# Altium footprint library PTUMotorDriver.PcbLib: 51 footprints (part 3 of 4)
Each footprint in its own frame and in the unit in brackets; x right, y up, seen from the top. Pads: shape width x height; smd on the part's side, far side on the other; paste and mask are expansions set on the pad; w line width, h text height; cw(c..) or ccw(c..) is an arc to the next point about the centre after c.
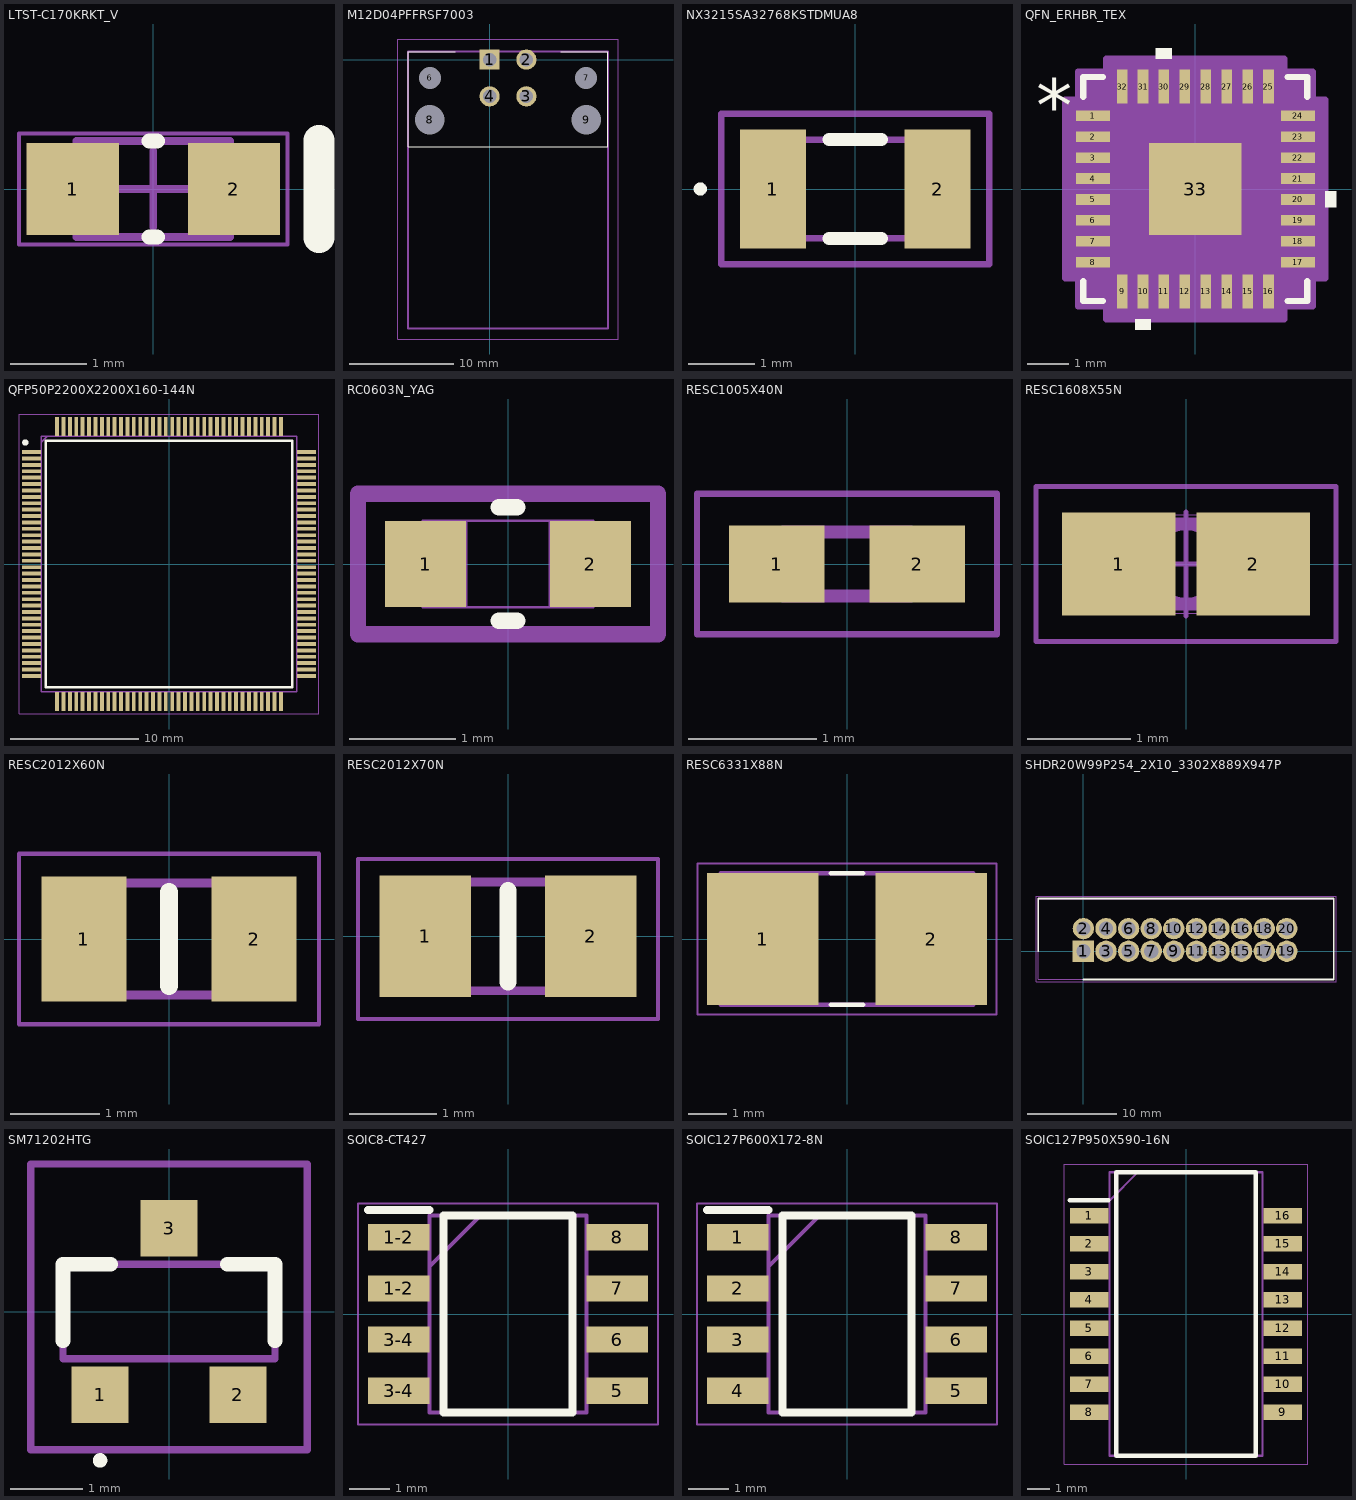
[diagram p2: the footprints below, top view; thin cyan lines are the x and y axes]

## LTST-C170KRKT_V [mm] "SMD, 2-Leads, Body 2x1.25mm"
height 1.2
pads (2):
  rect 1.2x1.2 smd: 1(-1.05,0) 2(1.05,0)
Top Overlay:
  lines w0.2: -0.051,-0.625 0.051,-0.625 ; -0.051,0.625 0.051,0.625
  lines w0.4: 2.159,-0.635 2.159,0.635
Top 3D Body:
  lines w0.1: -0.7,-0.625 -0.7,0.625 ; 0.7,-0.625 0.7,0.625 ; -1,-0.625 1,-0.625 1,0.625 -1,0.625 -1,-0.625
Top Courtyard:
  lines w0.05: -1.75,-0.725 -1.75,0.725 1.75,0.725 1.75,-0.725 -1.75,-0.725
  lines w0.1: -0.5,0 0.5,0 ; 0,-0.5 0,0.5
3D body: height 1.2, standoff 0.5, extent -0.7,-0.625 0.7,0.625
3D body: height 0.5, standoff 0, extent -1,-0.625 1,0.625

## M12D04PFFRSF7003 [mm]
pads (8):
  rect 1.95x1.95 hole 1.3: 1(0,0)
  round 1.95 hole 1.3: 2(3.536,0) 3(3.536,-3.536) 4(0,-3.536)
  round 1.05 hole 2.1 unplated: 6(-5.732,-1.768) 7(9.268,-1.768)
  round 1.425 hole 2.85 unplated: 8(-5.732,-5.768) 9(9.268,-5.768)
Top Overlay:
  lines w0.1: -3.312,0.772 -7.832,0.772 -7.832,-8.382 11.368,-8.382 11.368,0.772 6.848,0.772
Top 3D Body:
  lines w0.2: -7.832,-25.828 -7.832,0.772 11.368,0.772 11.368,-25.828 -7.832,-25.828
Top Courtyard:
  lines w0.1: -8.832,-26.828 -8.832,1.975 12.368,1.975 12.368,-26.828 -8.832,-26.828
3D body "M12D-04PFFR-SF7003.stp": height 15.88, standoff -3.32, extent -7.747,-25.201 11.432,1.579

## NX3215SA32768KSTDMUA8 [mm]
pads (2):
  rect 1x1.8 smd: 1(-1.25,0) 2(1.25,0)
Top Overlay:
  lines w0.1: -2.4,0 cw(c-2.35,0) -2.3,0 cw(c-2.35,0) -2.4,0
  lines w0.2: -0.4,-0.75 0.4,-0.75 ; -0.4,0.75 0.4,0.75
Top 3D Body:
  lines w0.1: -1.6,-0.75 -1.6,0.75 1.6,0.75 1.6,-0.75 -1.6,-0.75
Top Courtyard:
  lines w0.1: -2.032,-1.143 -2.032,1.143 2.032,1.143 2.032,-1.143 -2.032,-1.143
3D body "NX3215SA-32.768K-STD-MUA-8.stp": height 0.8, standoff 0, extent -1.6,-0.75 1.6,0.75

## QFN_ERHBR_TEX [mil]
pads (33):
  rect 32x10 smd paste+0 mask+0: 1(-96.5,68.92) 2(-96.5,49.23) 3(-96.5,29.54) 4(-96.5,9.85) 5(-96.5,-9.85) 6(-96.5,-29.54) 7(-96.5,-49.23) 8(-96.5,-68.92) 17(96.5,-68.92) 18(96.5,-49.23) 19(96.5,-29.54) 20(96.5,-9.85) 21(96.5,9.85) 22(96.5,29.54) 23(96.5,49.23) 24(96.5,68.92)
  rect 10x32 smd paste+0 mask+0: 9(-68.92,-96.5) 10(-49.23,-96.5) 11(-29.54,-96.5) 12(-9.85,-96.5) 13(9.85,-96.5) 14(29.54,-96.5) 15(49.23,-96.5) 16(68.92,-96.5) 25(68.92,96.5) 26(49.23,96.5) 27(29.54,96.5) 28(9.85,96.5) 29(-9.85,96.5) 30(-29.54,96.5) 31(-49.23,96.5) 32(-68.92,96.5)
  rect 87x87 smd paste+0 mask+0: 33(0,0)
Top Overlay:
  region: -41.73,-122.5 -56.73,-122.5 -56.73,-132.5 -41.73,-132.5
  region: 122.5,-2.35 132.5,-2.35 132.5,-17.34 122.5,-17.34
  region: -22.04,122.5 -37.03,122.5 -37.03,132.5 -22.04,132.5
  lines w6: -105.5,-87.02 -105.5,-105.5 -87.02,-105.5 ; -105.5,87.02 -105.5,105.5 -87.02,105.5 ; 87.02,-105.5 105.5,-105.5 105.5,-87.02 ; 87.02,105.5 105.5,105.5 105.5,87.02
  text "*" at -150,53.76 h50
Top 3D Body:
  lines w1: -100.5,50.5 -50.5,100.5 ; -100.5,-100.5 100.5,-100.5 100.5,100.5 -100.5,100.5 -100.5,-100.5 ; -100.5,-74.92 -100.5,-62.91 -100.5,-74.92 ; -100.5,-55.23 -100.5,-43.23 -100.5,-55.23 ; -100.5,-35.53 -100.5,-23.54 -100.5,-35.53 ; -100.5,-15.85 -100.5,-3.85 -100.5,-15.85 ; -100.5,3.85 -100.5,15.85 -100.5,3.85 ; -100.5,23.54 -100.5,35.53 -100.5,23.54 ; -100.5,43.23 -100.5,55.23 -100.5,43.23 ; -100.5,62.91 -100.5,74.92 -100.5,62.91 ; -74.92,-100.5 -62.91,-100.5 -74.92,-100.5 ; -74.92,100.5 -62.91,100.5 -74.92,100.5 ; -55.23,-100.5 -43.23,-100.5 -55.23,-100.5 ; -55.23,100.5 -43.23,100.5 -55.23,100.5 ; -35.53,-100.5 -23.54,-100.5 -35.53,-100.5 ; -35.53,100.5 -23.54,100.5 -35.53,100.5 ; -15.85,-100.5 -3.85,-100.5 -15.85,-100.5 ; -15.85,100.5 -3.85,100.5 -15.85,100.5 ; 3.85,-100.5 15.85,-100.5 3.85,-100.5 ; 3.85,100.5 15.85,100.5 3.85,100.5 ; 23.54,-100.5 35.53,-100.5 23.54,-100.5 ; 23.54,100.5 35.53,100.5 23.54,100.5 ; 43.23,-100.5 55.23,-100.5 43.23,-100.5 ; 43.23,100.5 55.23,100.5 43.23,100.5 ; 62.91,-100.5 74.92,-100.5 62.91,-100.5 ; 62.91,100.5 74.92,100.5 62.91,100.5 ; 100.5,-74.92 100.5,-62.91 100.5,-74.92 ; 100.5,-55.23 100.5,-43.23 100.5,-55.23 ; 100.5,-35.53 100.5,-23.54 100.5,-35.53 ; 100.5,-15.85 100.5,-3.85 100.5,-15.85 ; 100.5,3.85 100.5,15.85 100.5,3.85 ; 100.5,23.54 100.5,35.53 100.5,23.54 ; 100.5,43.23 100.5,55.23 100.5,43.23 ; 100.5,62.91 100.5,74.92 100.5,62.91
  text "*" at -93,53.76 h50
Top Courtyard:
  region: -83.92,-110.5 -110.5,-110.5 -110.5,-83.92 -122.5,-83.92 -122.5,83.92 -110.5,83.92 -110.5,110.5 -83.92,110.5 -83.92,122.5 83.92,122.5 83.92,110.5 110.5,110.5 110.5,83.92 122.5,83.92 122.5,-83.92 110.5,-83.92 110.5,-110.5 83.92,-110.5 83.92,-122.5 -83.92,-122.5
  lines w6: -122.5,-83.92 -110.5,-83.92 -110.5,-110.5 -83.92,-110.5 -83.92,-122.5 83.92,-122.5 83.92,-110.5 110.5,-110.5 110.5,-83.92 122.5,-83.92 122.5,83.92 110.5,83.92 110.5,110.5 83.92,110.5 83.92,122.5 -83.92,122.5 -83.92,110.5 -110.5,110.5 -110.5,83.92 -122.5,83.92 -122.5,-83.92
3D body "QFN_ERHBR_TEX.step": height 39.09, standoff 0, extent -100.51,-100.51 100.51,100.51

## QFP50P2200X2200X160-144N [mm]
pads (144):
  rect 1.475x0.3 smd: 1(-10.738,8.75) 2(-10.738,8.25) 3(-10.738,7.75) 4(-10.738,7.25) 5(-10.738,6.75) 6(-10.738,6.25) 7(-10.738,5.75) 8(-10.738,5.25) 9(-10.738,4.75) 10(-10.738,4.25) 11(-10.738,3.75) 12(-10.738,3.25) 13(-10.738,2.75) 14(-10.738,2.25) 15(-10.738,1.75) 16(-10.738,1.25) 17(-10.738,0.75) 18(-10.738,0.25) 19(-10.738,-0.25) 20(-10.738,-0.75) 21(-10.738,-1.25) 22(-10.738,-1.75) 23(-10.738,-2.25) 24(-10.738,-2.75) 25(-10.738,-3.25) 26(-10.738,-3.75) 27(-10.738,-4.25) 28(-10.738,-4.75) 29(-10.738,-5.25) 30(-10.738,-5.75) 31(-10.738,-6.25) 32(-10.738,-6.75) 33(-10.738,-7.25) 34(-10.738,-7.75) 35(-10.738,-8.25) 36(-10.738,-8.75) 73(10.738,-8.75) 74(10.738,-8.25) 75(10.738,-7.75) 76(10.738,-7.25) 77(10.738,-6.75) 78(10.738,-6.25) 79(10.738,-5.75) 80(10.738,-5.25) 81(10.738,-4.75) 82(10.738,-4.25) 83(10.738,-3.75) 84(10.738,-3.25) 85(10.738,-2.75) 86(10.738,-2.25) 87(10.738,-1.75) 88(10.738,-1.25) 89(10.738,-0.75) 90(10.738,-0.25) 91(10.738,0.25) 92(10.738,0.75) 93(10.738,1.25) 94(10.738,1.75) 95(10.738,2.25) 96(10.738,2.75) 97(10.738,3.25) 98(10.738,3.75) 99(10.738,4.25) 100(10.738,4.75) 101(10.738,5.25) 102(10.738,5.75) 103(10.738,6.25) 104(10.738,6.75) 105(10.738,7.25) 106(10.738,7.75) 107(10.738,8.25) 108(10.738,8.75)
  rect 0.3x1.475 smd: 37(-8.75,-10.738) 38(-8.25,-10.738) 39(-7.75,-10.738) 40(-7.25,-10.738) 41(-6.75,-10.738) 42(-6.25,-10.738) 43(-5.75,-10.738) 44(-5.25,-10.738) 45(-4.75,-10.738) 46(-4.25,-10.738) 47(-3.75,-10.738) 48(-3.25,-10.738) 49(-2.75,-10.738) 50(-2.25,-10.738) 51(-1.75,-10.738) 52(-1.25,-10.738) 53(-0.75,-10.738) 54(-0.25,-10.738) 55(0.25,-10.738) 56(0.75,-10.738) 57(1.25,-10.738) 58(1.75,-10.738) 59(2.25,-10.738) 60(2.75,-10.738) 61(3.25,-10.738) 62(3.75,-10.738) 63(4.25,-10.738) 64(4.75,-10.738) 65(5.25,-10.738) 66(5.75,-10.738) 67(6.25,-10.738) 68(6.75,-10.738) 69(7.25,-10.738) 70(7.75,-10.738) 71(8.25,-10.738) 72(8.75,-10.738) 109(8.75,10.738) 110(8.25,10.738) 111(7.75,10.738) 112(7.25,10.738) 113(6.75,10.738) 114(6.25,10.738) 115(5.75,10.738) 116(5.25,10.738) 117(4.75,10.738) 118(4.25,10.738) 119(3.75,10.738) 120(3.25,10.738) 121(2.75,10.738) 122(2.25,10.738) 123(1.75,10.738) 124(1.25,10.738) 125(0.75,10.738) 126(0.25,10.738) 127(-0.25,10.738) 128(-0.75,10.738) 129(-1.25,10.738) 130(-1.75,10.738) 131(-2.25,10.738) 132(-2.75,10.738) 133(-3.25,10.738) 134(-3.75,10.738) 135(-4.25,10.738) 136(-4.75,10.738) 137(-5.25,10.738) 138(-5.75,10.738) 139(-6.25,10.738) 140(-6.75,10.738) 141(-7.25,10.738) 142(-7.75,10.738) 143(-8.25,10.738) 144(-8.75,10.738)
Top Overlay:
  circle w0.25: c-11.225,9.5 r0.125
  lines w0.2: -9.65,-9.65 9.65,-9.65 9.65,9.65 -9.65,9.65 -9.65,-9.65
Top 3D Body:
  lines w0.1: -10,9.5 -9.5,10 ; -10,-10 10,-10 10,10 -10,10 -10,-10
Top Courtyard:
  lines w0.05: -11.725,-11.725 11.725,-11.725 11.725,11.725 -11.725,11.725 -11.725,-11.725
3D body "STM32H755ZIT6U.stp": height 1.6, standoff 0, extent -11,-11 11,11

## RC0603N_YAG [mil]
pads (2):
  rect 30x32 smd paste+0 mask+0: 1(-30.5,0) 2(30.5,0)
Top Overlay:
  lines w6: -3.39,-21 3.39,-21 ; -3.39,21 3.39,21
Top 3D Body:
  lines w1: -31.5,-16 -31.5,16 ; -31.5,-16 -15.5,-16 -15.5,16 -31.5,16 ; -31.5,-16 31.5,-16 ; -31.5,-16 -31.5,16 ; -31.5,16 31.5,16 ; 31.5,-16 15.5,-16 15.5,16 31.5,16 ; 31.5,-16 31.5,16 ; 31.5,-16 31.5,16
Top Courtyard:
  lines w6: -55.5,-26 -55.5,26 55.5,26 55.5,-26 -55.5,-26
3D body "RC0603N_YAG.step": height 27.99, standoff 0, extent -31.5,-15.98 31.5,15.98

## RESC1005X40N [mm]
pads (2):
  rect 0.75x0.6 smd: 1(-0.55,0) 2(0.55,0)
Top 3D Body:
  lines w0.1: -0.5,-0.25 0.5,-0.25 0.5,0.25 -0.5,0.25 -0.5,-0.25
Top Courtyard:
  lines w0.05: -1.175,-0.55 1.175,-0.55 1.175,0.55 -1.175,0.55 -1.175,-0.55
3D body "RC0402FR-07270RL.stp": height 0.4, standoff 0, extent -0.5,-0.25 0.5,0.25

## RESC1608X55N [mm]
pads (2):
  rect 1.1x1 smd: 1(-0.65,0) 2(0.65,0)
Top 3D Body:
  lines w0.1: -0.8,-0.4 0.8,-0.4 0.8,0.4 -0.8,0.4 -0.8,-0.4
Top Courtyard:
  circle w0.05: c0,0 r0.35
  lines w0.001: -0.85,-0.475 0.85,-0.475 0.85,0.475 -0.85,0.475 -0.85,-0.475
  lines w0.05: -0.5,0 0.5,0 ; 0,-0.5 0,0.5 ; -1.45,-0.75 1.45,-0.75 1.45,0.75 -1.45,0.75 -1.45,-0.75
3D body "RC0603FR-07470RL.stp": height 0.55, standoff 0, extent -0.8,-0.4 0.8,0.4

## RESC2012X60N [mm]
pads (2):
  rect 0.95x1.4 smd: 1(-0.95,0) 2(0.95,0)
Top Overlay:
  lines w0.2: 0,-0.525 0,0.525
Top 3D Body:
  lines w0.1: -1,-0.625 1,-0.625 1,0.625 -1,0.625 -1,-0.625
Top Courtyard:
  lines w0.05: -1.675,-0.95 1.675,-0.95 1.675,0.95 -1.675,0.95 -1.675,-0.95
3D body "RC0805JR-0710KL.stp": height 0.6, standoff 0, extent -1,-0.625 1,0.625

## RESC2012X70N [mm]
pads (2):
  rect 1.05x1.4 smd: 1(-0.95,0) 2(0.95,0)
Top Overlay:
  lines w0.2: 0,-0.525 0,0.525
Top 3D Body:
  lines w0.1: -1,-0.625 -1,0.625 1,0.625 1,-0.625 -1,-0.625
Top Courtyard:
  lines w0.05: -1.725,-0.95 -1.725,0.889 1.725,0.889 1.725,-0.95 -1.725,-0.95
3D body "ERJ-6GEYJ103V.stp": height 0.6, standoff 0, extent -1,-0.625 1,0.625

## RESC6331X88N [mm]
pads (2):
  rect 2.91x3.44 smd: 1(-2.201,0) 2(2.201,0)
Top Overlay:
  lines w0.127: -0.42,-1.72 0.42,-1.72 ; -0.42,1.72 0.42,1.72
Top 3D Body:
  lines w0.127: -3.3,-1.72 -3.3,1.72 3.3,1.72 3.3,-1.72 -3.3,-1.72
Top Courtyard:
  lines w0.05: -3.906,-1.971 -3.906,1.971 3.906,1.971 3.906,-1.971 -3.906,-1.971

## SHDR20W99P254_2X10_3302X889X947P [mm]
pads (20):
  rect 2.4x2.4 hole 1.6: 1(0,0)
  round 2.4 hole 1.6: 2(0,2.54) 3(2.54,0) 4(2.54,2.54) 5(5.08,0) 6(5.08,2.54) 7(7.62,0) 8(7.62,2.54) 9(10.16,0) 10(10.16,2.54) 11(12.7,0) 12(12.7,2.54) 13(15.24,0) 14(15.24,2.54) 15(17.78,0) 16(17.78,2.54) 17(20.32,0) 18(20.32,2.54) 19(22.86,0) 20(22.86,2.54)
Top Overlay:
  lines w0.2: -5.08,0 -5.08,5.915 28.14,5.915 28.14,-3.175 0,-3.175
Top 3D Body:
  lines w0.1: -5.08,-3.175 28.14,-3.175 28.14,5.915 -5.08,5.915 -5.08,-3.175
Top Courtyard:
  lines w0.05: -5.33,-3.425 28.39,-3.425 28.39,6.165 -5.33,6.165 -5.33,-3.425
3D body "70246-2001.stp": height 9.15, standoff -3.54, extent -4.98,-3.175 28.04,5.715

## SM71202HTG [mm]
pads (3):
  rect 0.78x0.78 smd: 1(-0.95,-1.145) 2(0.95,-1.145) 3(0,1.145)
Top Overlay:
  lines w0.1: -0.95,-2.1 cw(c-0.95,-2.05) -0.95,-2 cw(c-0.95,-2.05) -0.95,-2.1
  lines w0.2: -1.46,-0.4 -1.46,0.65 -0.8,0.65 ; 0.8,0.65 1.46,0.65 1.46,-0.4
Top 3D Body:
  lines w0.1: -1.46,-0.65 1.46,-0.65 1.46,0.65 -1.46,0.65 -1.46,-0.65
Top Courtyard:
  lines w0.1: -1.905,-1.905 1.905,-1.905 1.905,2.032 -1.905,2.032 -1.905,-1.905
3D body "SM712-02HTG.stp": height 1.12, standoff 0, extent -1.52,-1.32 1.52,1.32

## SOIC8-CT427 [mm]
pads (8):
  rect 1.525x0.65 smd: 1-2(-2.712,0.635) 1-2(-2.712,1.905) 3-4(-2.712,-1.905) 3-4(-2.712,-0.635) 5(2.712,-1.905) 6(2.712,-0.635) 7(2.712,0.635) 8(2.712,1.905)
Top Overlay:
  lines w0.2: -3.475,2.58 -1.95,2.58 ; -1.6,-2.445 -1.6,2.445 1.6,2.445 1.6,-2.445 -1.6,-2.445
Top 3D Body:
  lines w0.1: -1.95,1.175 -0.68,2.445 ; -1.95,-2.445 -1.95,2.445 1.95,2.445 1.95,-2.445 -1.95,-2.445
Top Courtyard:
  lines w0.05: -3.725,-2.74 -3.725,2.74 3.725,2.74 3.725,-2.74 -3.725,-2.74
3D body "CT417-HSN820MR.stp": height 1.72, standoff 0, extent -3,-2.445 3,2.445

## SOIC127P600X172-8N [mm]
pads (8):
  rect 1.525x0.65 smd: 1(-2.712,1.905) 2(-2.712,0.635) 3(-2.712,-0.635) 4(-2.712,-1.905) 5(2.712,-1.905) 6(2.712,-0.635) 7(2.712,0.635) 8(2.712,1.905)
Top Overlay:
  lines w0.2: -3.475,2.58 -1.95,2.58 ; -1.6,-2.445 1.6,-2.445 1.6,2.445 -1.6,2.445 -1.6,-2.445
Top 3D Body:
  lines w0.1: -1.95,1.175 -0.68,2.445 ; -1.95,-2.445 1.95,-2.445 1.95,2.445 -1.95,2.445 -1.95,-2.445
Top Courtyard:
  lines w0.05: -3.725,-2.74 3.725,-2.74 3.725,2.74 -3.725,2.74 -3.725,-2.74
3D body "CT417-HSN820MR.stp": height 1.72, standoff 0, extent -3,-2.445 3,2.445

## SOIC127P950X590-16N [mm]
pads (16):
  rect 1.75x0.7 smd: 1(-4.375,4.445) 2(-4.375,3.175) 3(-4.375,1.905) 4(-4.375,0.635) 5(-4.375,-0.635) 6(-4.375,-1.905) 7(-4.375,-3.175) 8(-4.375,-4.445) 9(4.375,-4.445) 10(4.375,-3.175) 11(4.375,-1.905) 12(4.375,-0.635) 13(4.375,0.635) 14(4.375,1.905) 15(4.375,3.175) 16(4.375,4.445)
Top Overlay:
  lines w0.2: -5.25,5.145 -3.5,5.145 ; -3.15,-6.4 -3.15,6.4 3.15,6.4 3.15,-6.4 -3.15,-6.4
Top 3D Body:
  lines w0.1: -3.45,5.13 -2.18,6.4 ; -3.45,-6.4 -3.45,6.4 3.45,6.4 3.45,-6.4 -3.45,-6.4
Top Courtyard:
  lines w0.05: -5.5,-6.775 -5.5,6.775 5.5,6.775 5.5,-6.775 -5.5,-6.775
3D body "SM91072AL-E.stp": height 5.9, standoff 0, extent -4.75,-6.4 4.75,6.4